# Altium footprint library W5500-EVB-Pico2_V100.PcbLib: 30 footprints (part 2 of 2)
Each footprint in its own frame and in the unit in brackets; x right, y up, seen from the top. Pads: shape width x height; smd on the part's side, far side on the other; paste and mask are expansions set on the pad; w line width, h text height; cw(c..) or ccw(c..) is an arc to the next point about the centre after c.
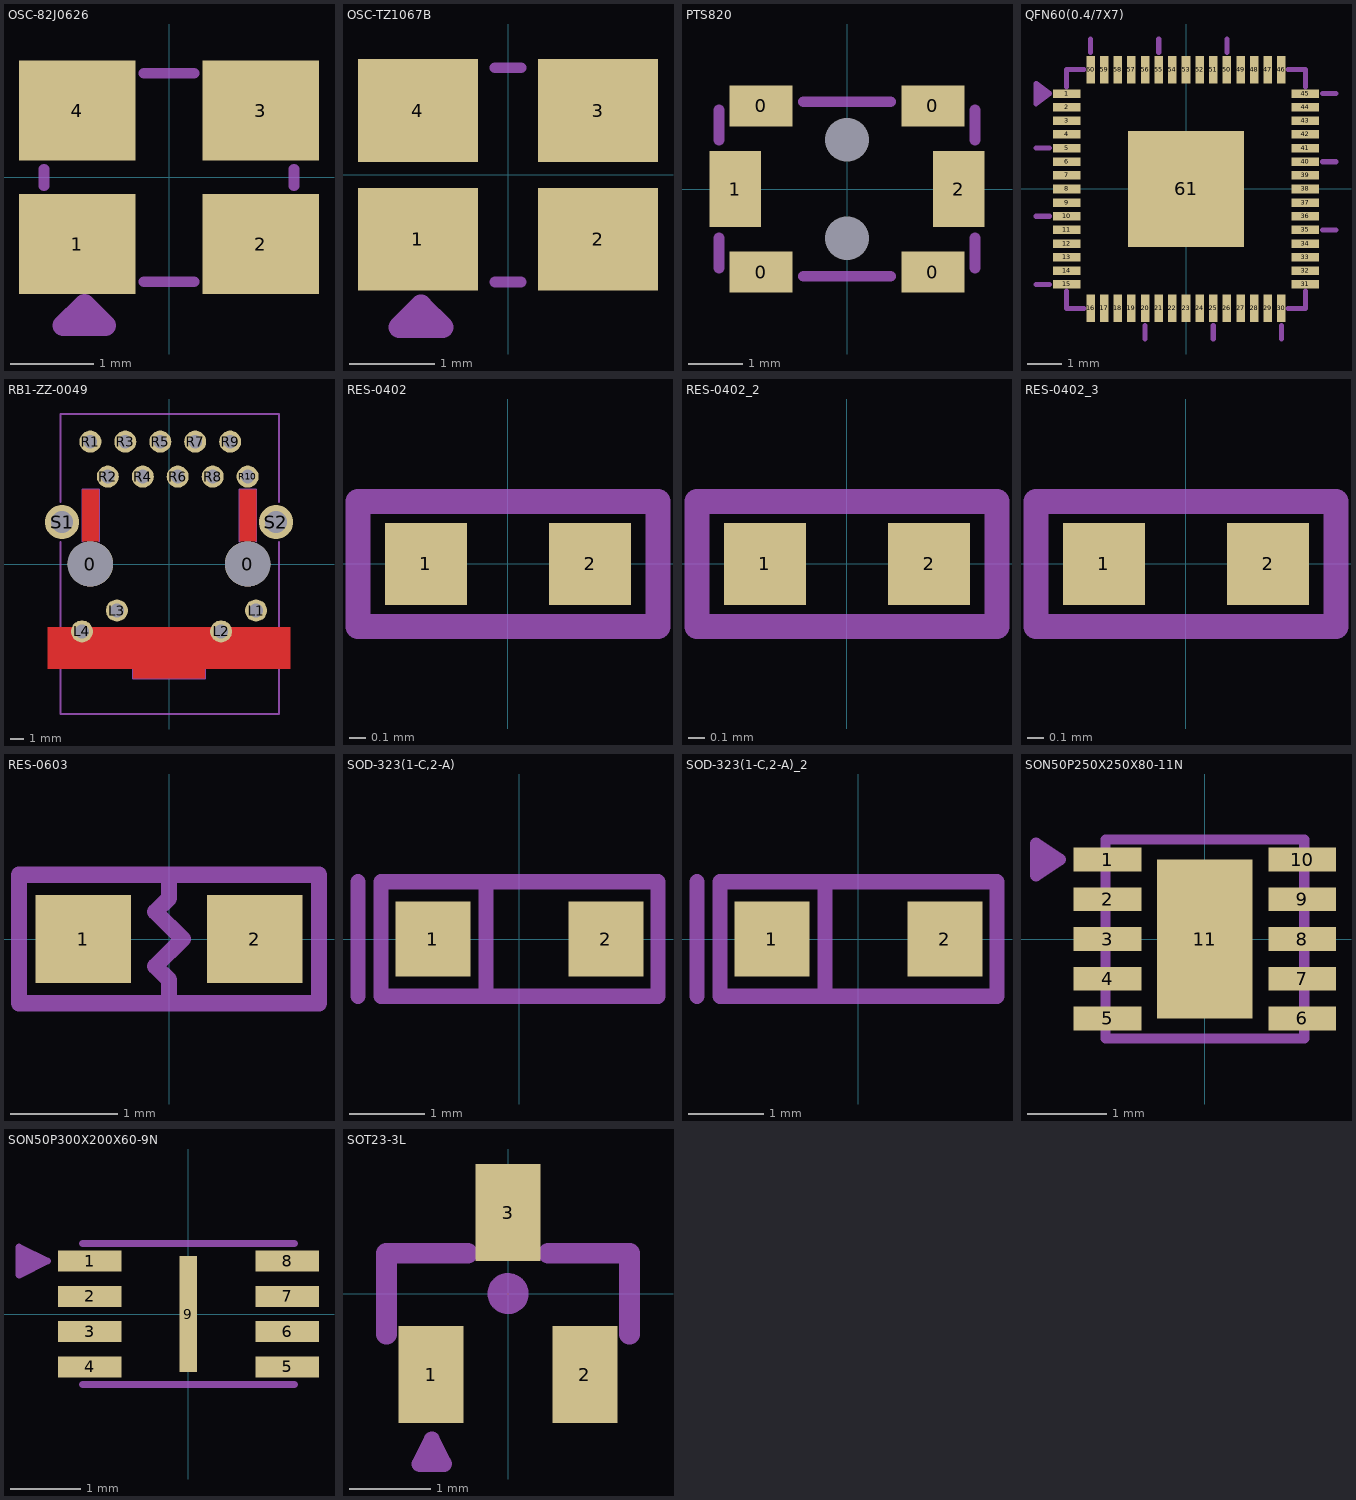
[diagram p1: the footprints below, top view; thin cyan lines are the x and y axes]

## OSC-82J0626 [mm]
height 4.35
pads (4):
  rect 1.4x1.2 smd: 1(-1.1,-0.8) 2(1.1,-0.8) 3(1.1,0.8) 4(-1.1,0.8)
Mechanical 3:
  lines w0.127: -1.5,-0.1 -1.5,0.1 ; -0.3,-1.25 0.3,-1.25 ; -0.3,1.25 0.3,1.25 ; 1.5,-0.1 1.5,0.1
  lines w0.254: -1.27,-1.778 -1.016,-1.524 -0.762,-1.778 -1.27,-1.778
3D body "User Library-ABRACON_ASE.STEP": height 1.06, standoff 0.02, extent -1.7,-1.35 1.7,1.35

## OSC-TZ1067B [mm]
pads (4):
  rect 1.4x1.2 smd: 1(-1.05,-0.75) 2(1.05,-0.75) 3(1.05,0.75) 4(-1.05,0.75)
Mechanical 3:
  lines w0.127: -0.15,-1.25 0.15,-1.25 ; -0.15,1.25 0.15,1.25
  lines w0.254: -1.27,-1.778 -0.762,-1.778 -1.016,-1.524 -1.27,-1.778
3D body "User Library-ABRACON_ASE.STEP": height 1.06, standoff 0.02, extent -1.7,-1.35 1.7,1.35

## PTS820 [mm]
pads (8):
  rect 1.15x0.75 smd: 0(-1.575,-1.525) 0(-1.575,1.525) 0(1.575,-1.525) 0(1.575,1.525)
  round 0 hole 0.8: 0(0,-0.9) 0(0,0.9)
  rect 0.95x1.4 smd: 1(-2.05,0) 2(2.05,0)
Mechanical 3:
  lines w0.2: -2.35,-1.45 -2.35,-0.9 ; -2.35,0.9 -2.35,1.45 ; -0.8,-1.6 0.8,-1.6 ; -0.8,1.6 0.8,1.6 ; 2.35,-1.45 2.35,-0.9 ; 2.35,0.9 2.35,1.45
3D body "User Library-pts820_15_pb.STEP": height 1.7, standoff -0.5, extent -2.176,-1.45 2.176,1.45

## QFN60(0.4/7X7) [mm]
pads (61):
  rect 0.8x0.25 smd: 1(-3.5,2.8) 2(-3.5,2.4) 3(-3.5,2) 4(-3.5,1.6) 5(-3.5,1.2) 6(-3.5,0.8) 7(-3.5,0.4) 8(-3.5,0) 9(-3.5,-0.4) 10(-3.5,-0.8) 11(-3.5,-1.2) 12(-3.5,-1.6) 13(-3.5,-2) 14(-3.5,-2.4) 15(-3.5,-2.8) 31(3.5,-2.8) 32(3.5,-2.4) 33(3.5,-2) 34(3.5,-1.6) 35(3.5,-1.2) 36(3.5,-0.8) 37(3.5,-0.4) 38(3.5,0) 39(3.5,0.4) 40(3.5,0.8) 41(3.5,1.2) 42(3.5,1.6) 43(3.5,2) 44(3.5,2.4) 45(3.5,2.8)
  rect 0.25x0.8 smd: 16(-2.8,-3.5) 17(-2.4,-3.5) 18(-2,-3.5) 19(-1.6,-3.5) 20(-1.2,-3.5) 21(-0.8,-3.5) 22(-0.4,-3.5) 23(0,-3.5) 24(0.4,-3.5) 25(0.8,-3.5) 26(1.2,-3.5) 27(1.6,-3.5) 28(2,-3.5) 29(2.4,-3.5) 30(2.8,-3.5) 46(2.8,3.5) 47(2.4,3.5) 48(2,3.5) 49(1.6,3.5) 50(1.2,3.5) 51(0.8,3.5) 52(0.4,3.5) 53(0,3.5) 54(-0.4,3.5) 55(-0.8,3.5) 56(-1.2,3.5) 57(-1.6,3.5) 58(-2,3.5) 59(-2.4,3.5) 60(-2.8,3.5)
  rect 3.4x3.4 smd: 61(0,0)
Mechanical 3:
  region: -4.4,2.5 -4.4,3.1 -4,2.8
  lines w0.15: -4.4,-2.8 -4,-2.8 ; -4.4,-0.8 -4,-0.8 ; -4.4,1.2 -4,1.2 ; -3.5,-3 -3.5,-3.5 -3,-3.5 ; -3.5,3 -3.5,3.5 -3,3.5 ; -2.8,4 -2.8,4.4 ; -1.2,-4.4 -1.2,-4 ; -0.8,4 -0.8,4.4 ; 0.8,-4.4 0.8,-4 ; 1.2,4 1.2,4.4 ; 2.8,-4.4 2.8,-4 ; 3,-3.5 3.5,-3.5 3.5,-3 ; 3,3.5 3.5,3.5 3.5,3 ; 4,-1.2 4.4,-1.2 ; 4,0.8 4.4,0.8 ; 4,2.8 4.4,2.8 ; -4.4,2.5 -4.4,3.1 -4,2.8 -4.4,2.5
3D body: height 1, standoff 0, extent -3.5,-3.5 3.5,3.5

## RB1-ZZ-0049 [mm]
pads (18):
  round 3.3 hole 3.3: 0(-5.715,0) 0(5.715,0)
  round 1.6 hole 1: L1(6.325,-3.38) L2(3.785,-4.9) L3(-3.785,-3.38) L4(-6.325,-4.9) R1(-5.715,8.89) R2(-4.445,6.35) R3(-3.175,8.89) R4(-1.905,6.35) R5(-0.635,8.89) R6(0.635,6.35) R7(1.905,8.89) R8(3.175,6.35) R9(4.445,8.89) R10(5.715,6.35)
  round 2.5 hole 1.6: S1(-7.775,3.05) S2(7.775,3.05)
Top Layer:
  pour cut-out: -6.3,1.65 -6.3,5.4 -5.1,5.4 -5.1,1.65
  pour cut-out: 5.13,1.65 5.13,5.4 6.33,5.4 6.33,1.65
  pour cut-out: -2.6,-8.3 -2.6,-5.4 2.6,-5.4 2.6,-8.3
  pour cut-out: -8.8,-7.6 8.8,-7.6 8.8,-4.6 -8.8,-4.6
Mechanical 3:
  lines w0.15: -7.9,1.6 -7.9,-10.9 8,-10.9 8,1.6 ; -7.9,4.5 -7.9,10.9 8,10.9 8,4.5 ; -6.3,1.65 -6.3,5.4 -5.1,5.4 -5.1,1.65 ; 5.13,1.65 5.13,5.4 6.33,5.4 6.33,1.65 ; -2.6,-8.3 2.6,-8.3 2.6,-5.4 -2.6,-5.4 -2.6,-8.3
3D body: height 13.35, standoff 0, extent -7.9,-10.9 8,10.9

## RES-0402 [mm]
pads (2):
  rect 0.5x0.5 smd: 1(-0.5,0) 2(0.5,0)
Mechanical 3:
  lines w0.152: -0.914,-0.381 0.914,-0.381 0.914,0.381 -0.914,0.381 -0.914,-0.381
3D body "RES_C1005X04N.STEP": height 0.35, standoff 0, extent -0.5,-0.254 0.5,0.246

## RES-0402_2 [mm]
pads (2):
  rect 0.5x0.5 smd: 1(-0.5,0) 2(0.5,0)
Mechanical 3:
  lines w0.152: -0.914,-0.381 -0.914,0.381 0.914,0.381 0.914,-0.381 -0.914,-0.381
3D body "RES_C1005X04N.STEP": height 0.35, standoff 0, extent -0.5,-0.254 0.5,0.246

## RES-0402_3 [mm]
pads (2):
  rect 0.5x0.5 smd: 1(-0.5,0) 2(0.5,0)
Mechanical 3:
  lines w0.152: -0.914,-0.381 -0.914,0.381 0.914,0.381 0.914,-0.381 -0.914,-0.381
3D body "RES_C1005X04N.STEP": height 0.35, standoff 0, extent -0.5,-0.254 0.5,0.246

## RES-0603 [mm] "RES-0603"
height 1
pads (2):
  rect 0.89x0.82 smd: 1(-0.8,0) 2(0.8,0)
Mechanical 3:
  lines w0.152: 0,-0.6 0,-0.381 -0.127,-0.254 0.127,0 -0.127,0.254 0,0.381 0,0.6 ; -1.4,-0.6 -1.4,0.6 1.4,0.6 1.4,-0.6 -1.4,-0.6
3D body "User Library-Resistors0603.STEP": height 0.46, standoff -0.01, extent -0.824,-0.412 0.825,0.413

## SOD-323(1-C,2-A) [mm]
height 4.35
pads (2):
  rect 1x1 smd: 1(-1.15,0) 2(1.15,0)
Mechanical 3:
  lines w0.203: -2.146,-0.762 -2.146,0.762 ; -0.445,-0.762 -0.445,0.762 ; -1.841,-0.762 -1.841,0.762 1.841,0.762 1.841,-0.762 -1.841,-0.762
3D body "SOD-323F.STEP": height 0.79, standoff -0.08, extent -1.35,-0.674 1.35,0.676

## SOD-323(1-C,2-A)_2 [mm]
pads (2):
  rect 1x1 smd: 1(-1.15,0) 2(1.15,0)
Mechanical 3:
  lines w0.203: -2.146,-0.762 -2.146,0.762 ; -0.445,-0.762 -0.445,0.762 ; -1.841,-0.762 1.841,-0.762 1.841,0.762 -1.841,0.762 -1.841,-0.762
3D body "SOD-323F.STEP": height 0.79, standoff -0.08, extent -1.35,-0.674 1.35,0.676

## SON50P250X250X80-11N [mm]
height 0.8
pads (11):
  rect 0.85x0.3 smd mask+0.05: 1(-1.225,1) 2(-1.225,0.5) 3(-1.225,0) 4(-1.225,-0.5) 5(-1.225,-1) 6(1.225,-1) 7(1.225,-0.5) 8(1.225,0) 9(1.225,0.5) 10(1.225,1)
  rect 1.2x2 smd paste-2 mask+0.05: 11(0,0)
Top Paste:
  region: 0.379,-0.632 -0.379,-0.632 -0.379,0.632 0.379,0.632
Mechanical 3:
  region: -2.125,0.8 -2.125,1.2 -1.825,1
  lines w0.127: -1.25,-1.25 -1.25,1.25 1.25,1.25 1.25,-1.25 -1.25,-1.25
  lines w0.15: -2.125,0.8 -1.825,1 -2.125,1.2 -2.125,0.8
3D body "step_temp.STEP": height 0.8, standoff 0, extent -1.25,-1.25 1.25,1.25

## SON50P300X200X60-9N [mm]
pads (9):
  rect 0.9x0.3 smd: 1(-1.4,0.75) 2(-1.4,0.25) 3(-1.4,-0.25) 4(-1.4,-0.75) 5(1.4,-0.75) 6(1.4,-0.25) 7(1.4,0.25) 8(1.4,0.75)
  rect 0.25x1.65 smd: 9(0,0)
Mechanical 3:
  region: -2.4,0.55 -2.4,0.95 -2,0.75
  lines w0.1: -1.5,-1 1.5,-1 ; -1.5,1 1.5,1 ; -2.4,0.55 -2,0.75 -2.4,0.95 -2.4,0.55
3D body "W25Q16JVUXIQ_TR.stp": height 0.6, standoff 0, extent -1.55,-1 1.55,1

## SOT23-3L [mm]
height 4.35
pads (3):
  rect 0.8x1.2 smd paste-0.07: 1(-0.95,-1) 2(0.95,-1) 3(0,1)
Mechanical 3:
  circle w0.254: c0,0 r0.127
  lines w0.2: -0.94,-1.803 -0.791,-2.1
  lines w0.203: -0.94,-1.803 -1.09,-2.103 -0.798,-2.103
  lines w0.254: -1.5,-0.5 -1.5,0.5 -0.5,0.5 ; 0.5,0.5 1.5,0.5 1.5,-0.5
3D body "SOT23.STEP": height 1.28, standoff 0, extent -1.45,-1.4 1.45,1.4